# Altium footprint library PCB_Libraries.PcbLib: 49 footprints (part 4 of 4)
Each footprint in its own frame and in the unit in brackets; x right, y up, seen from the top. Pads: shape width x height; smd on the part's side, far side on the other; paste and mask are expansions set on the pad; w line width, h text height; cw(c..) or ccw(c..) is an arc to the next point about the centre after c.
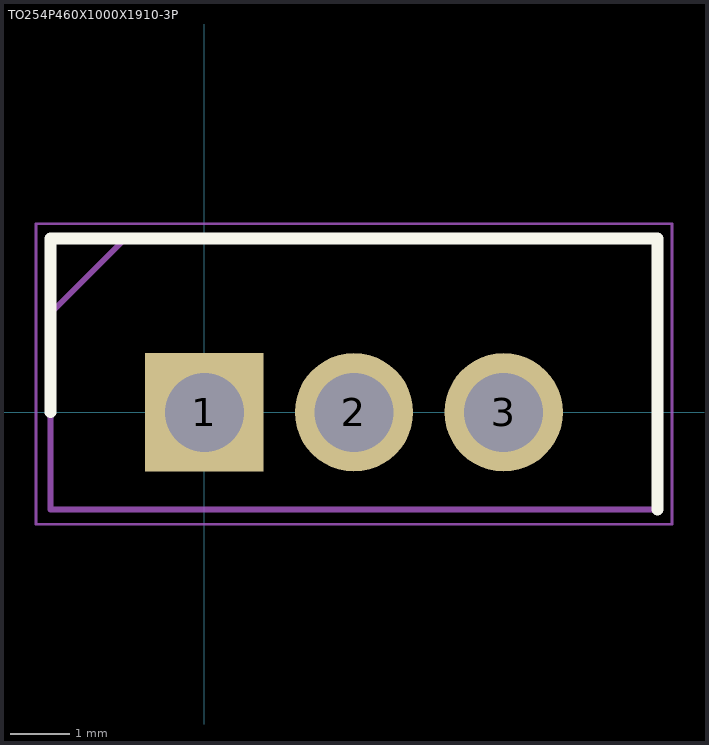
[diagram p3: the footprint, top view; thin cyan lines are the x and y axes]

## TO254P460X1000X1910-3P [mm]
pads (3):
  rect 2.01x2.01 hole 1.34: 1(0,0)
  round 2.01 hole 1.34: 2(2.54,0) 3(5.08,0)
Top Overlay:
  lines w0.2: -2.61,0 -2.61,2.95 7.69,2.95 7.69,-1.65
Mechanical 13:
  lines w0.1: -2.61,1.68 -1.34,2.95 ; -2.61,-1.65 -2.61,2.95 7.69,2.95 7.69,-1.65 -2.61,-1.65
Mechanical 15:
  lines w0.05: -2.86,-1.9 -2.86,3.2 7.94,3.2 7.94,-1.9 -2.86,-1.9
3D body "BT139X-800,127.stp": height 18.54, standoff -18.2, extent -2.46,-1.65 7.54,2.95